# Altium footprint library Fred..PcbLib: 39 footprints (part 3 of 3)
Each footprint in its own frame and in the unit in brackets; x right, y up, seen from the top. Pads: shape width x height; smd on the part's side, far side on the other; paste and mask are expansions set on the pad; w line width, h text height; cw(c..) or ccw(c..) is an arc to the next point about the centre after c.
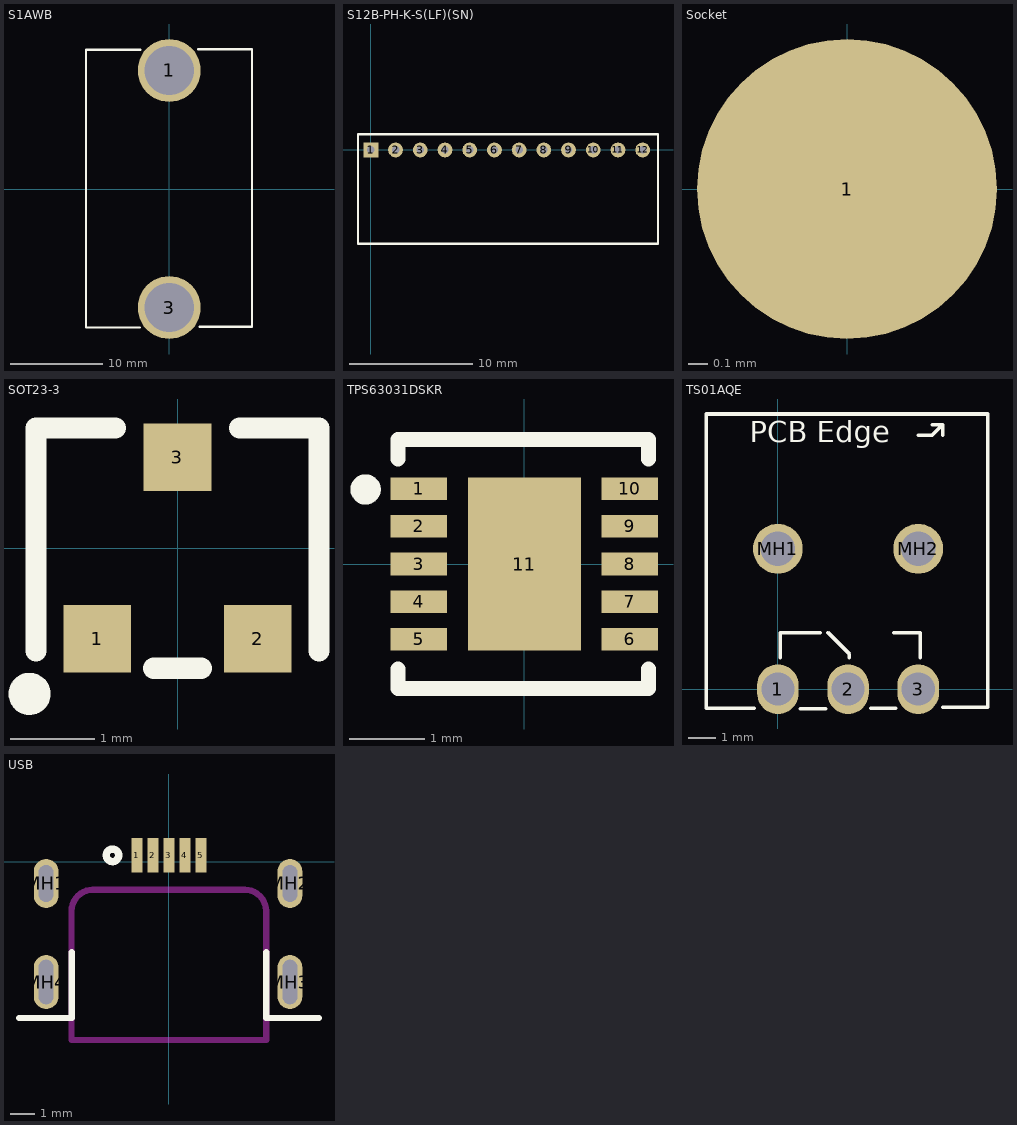
[diagram p2: the footprints below, top view; thin cyan lines are the x and y axes]

## S1AWB [mm] "Toggle Switch SPST Panel Mount ON-NONE-OFF 20A @ 30VDC, Panel Mount, Solder Lug, IP68 Waterproof"
pads (2):
  round 6.8 hole 5.3: 1(0,12.803) 3(0,-12.803)
Top Overlay:
  lines w0.254: -3.175,-14.961 -8.992,-14.961 -8.992,15.037 -3.15,15.037 ; 3.124,15.113 8.941,15.113 8.941,-14.884 3.277,-14.884
3D body "S1AWB.stp": height 47.9, standoff -5.69, extent -9.017,-14.93 8.992,15.067

## S12B-PH-K-S(LF)(SN) [mm] "CONN HEADER R/A 12POS 2MM"
pads (12):
  rect 1.2x1.2 hole 0.6: 1(0,0)
  round 1.2 hole 0.6: 2(2,0) 3(4,0) 4(6,0) 5(8,0) 6(10,0) 7(12,0) 8(14,0) 9(16,0) 10(18,0) 11(20,0) 12(22,0)
Top Overlay:
  lines w0.2: -1.041,-7.595 -1.041,1.245 -1.016,1.27 23.241,1.27 23.241,-7.595 -1.041,-7.595

## Socket [mil]
pads (1):
  round 60 smd: 1(0,0)

## SOT23-3 [mm] "SOT23, 3-Leads, Body 2.9x1.3mm, Pitch 0.95mm, Lead Span 2.3mm - Reverse Pinning, IPC High Density"
height 1.1
pads (3):
  rect 0.8x0.8 smd: 1(-0.95,-1.075) 2(0.95,-1.075) 3(0,1.075)
Top Overlay:
  circle w0.25: c-1.753,-1.727 r0.125
  lines w0.254: -1.677,-1.219 -1.677,1.422 -0.737,1.422 ; -0.28,-1.422 0.279,-1.422 ; 0.736,1.422 1.676,1.422 1.676,-1.219
3D body "CircuitWorks-SOT-23.step": height 1.05, standoff -0.05, extent -1.5,-1.25 1.5,1.25

## TPS63031DSKR [mm] "Conv DC-DC 1.8V to 5.5V Non-Inv/Inv/Step Up/Step Down Single-Out 3.3V 0.8A 10-Pin WSON"
pads (11):
  rect 0.75x0.3 smd: 1(-1.4,1) 2(-1.4,0.5) 3(-1.4,0) 4(-1.4,-0.5) 5(-1.4,-1) 6(1.4,-1) 7(1.4,-0.5) 8(1.4,0) 9(1.4,0.5) 10(1.4,1)
  rect 1.5x2.3 smd: 11(0,0)
Top Overlay:
  circle w0.2: c-2.108,0.991 r0.102
  lines w0.2: -1.676,-1.397 -1.676,-1.651 1.651,-1.651 1.651,-1.397 ; -1.676,1.397 -1.676,1.651 1.651,1.651 1.651,1.397
3D body "User Library-My-DFN-10-3x3-0_5.STEP": height 0.7, standoff -0.1, extent -1.575,-1.55 1.545,1.55

## TS01AQE [mm] "2 Position SPDT Miniature Slide Switch 3A 120V Through Hole, Right Angle"
pads (5):
  oval 1.5x1.8 hole 1.2: 1(0,0) 2(2.54,0) 3(5.08,0)
  round 1.8 hole 1.25: MH1(0,5.08) MH2(5.08,5.08)
Top Overlay:
  lines w0.127: -0.864,-0.686 -2.591,-0.686 -2.591,9.957 7.595,9.957 7.595,-0.66 5.969,-0.66 ; 0.083,1.143 0.083,2.032 1.531,2.032 ; 0.813,-0.711 1.727,-0.711 ; 1.813,2.048 2.591,1.27 2.591,1.143 ; 3.353,-0.686 4.267,-0.686 ; 4.198,2.032 5.15,2.032 5.15,1.143 ; 5.08,9.195 5.588,9.195 5.969,9.576 ; 5.588,9.576 5.969,9.576 ; 5.969,9.195 5.969,9.576
  text "PCB Edge" at -1.016,8.941 h0.76
3D body "TS01AQE.stp": height 5.54, standoff -3.42, extent -2.565,-0.686 7.595,12.979

## USB [mm] "Mcro USB connector SMD (B type)"
pads (9):
  rect 0.45x1.4 smd: 1(-1.3,0.254) 2(-0.65,0.254) 3(0,0.254) 4(0.65,0.254) 5(1.3,0.254)
  oval 1x2 hole 0.6 slot 1.5 at 90 deg: MH1(-4.983,-0.889) MH2(4.917,-0.889)
  oval 1x2.2 hole 0.6 slot 1.8 at 90 deg: MH3(4.917,-4.889) MH4(-4.983,-4.889)
Top Overlay:
  circle w0.3: c-2.286,0.254 r0.254
  lines w0.254: -6.083,-6.35 -3.937,-6.35 -3.937,-3.683 ; 3.95,-3.683 3.95,-6.35 6.096,-6.35
Keep-Out Layer:
  lines w0.254: -3.95,-3.048 -3.95,-2.008 cw(c-3.085,-2.008) -3.085,-1.143 3.085,-1.143 cw(c3.085,-2.008) 3.95,-2.008 3.95,-2.921 ; -3.95,-2.262 -3.95,-7.239 3.95,-7.239 3.95,-2.262
3D body "Mirco USB .stp": height 1.76, standoff -1.22, extent -5.1,-7.23 5.1,0